# Altium footprint library FPGAENTRY.PcbLib: 36 footprints (part 2 of 3)
Each footprint in its own frame and in the unit in brackets; x right, y up, seen from the top. Pads: shape width x height; smd on the part's side, far side on the other; paste and mask are expansions set on the pad; w line width, h text height; cw(c..) or ccw(c..) is an arc to the next point about the centre after c.
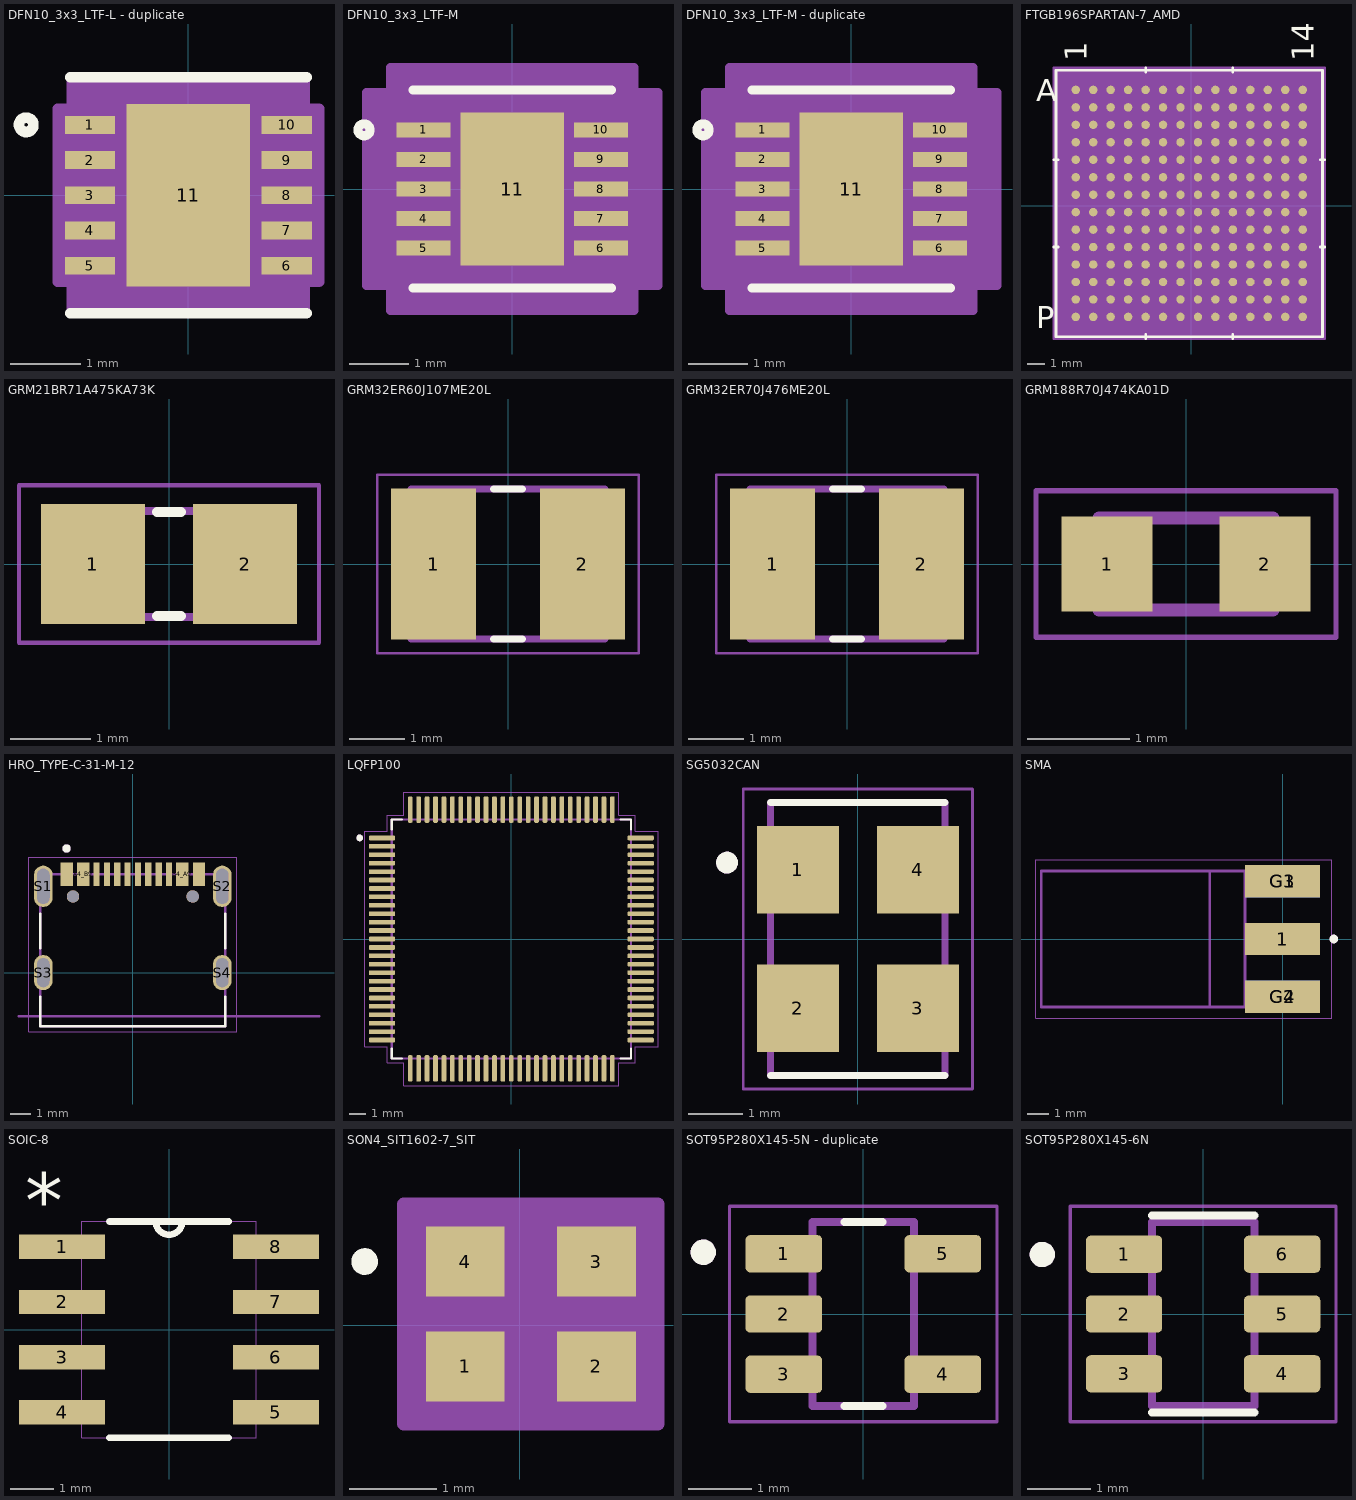
[diagram p1: the footprints below, top view; thin cyan lines are the x and y axes]

## DFN10_3x3_LTF-L - duplicate [mil]
pads (11):
  rect 28x10 smd paste+0 mask+0: 1(-55,39.37) 2(-55,19.68) 3(-55,0) 4(-55,-19.68) 5(-55,-39.37) 6(55,-39.37) 7(55,-19.68) 8(55,0) 9(55,19.68) 10(55,39.37)
  rect 69x102 smd paste+0 mask+0: 11(0,0)
Top Overlay:
  circle w6: c-90.69,39.37 r4
  lines w6: -66,-66 66,-66 ; -66,66 66,66
  text ".Designator" at -137.5,-25 h50
Top Paste:
  region: 30.56,47.06 -30.56,47.06 -30.56,3.94 30.56,3.94
  region: 30.56,-3.94 -30.56,-3.94 -30.56,-47.06 30.56,-47.06
Mechanical 13:
  circle w1: c-41,39.37 r3
  lines w1: -12,61 ccw(c0,61) 12,61 ; -61,-61 61,-61 61,61 -61,61 -61,-61
  text ".Designator" at -137.5,-25 h50
Mechanical 15:
  region: -65,-48.37 -73,-48.37 -73,48.37 -65,48.37 -65,65 65,65 65,48.37 73,48.37 73,-48.37 65,-48.37 65,-65 -65,-65
  lines w6: -73,-48.37 -73,48.37 -65,48.37 -65,65 65,65 65,48.37 73,48.37 73,-48.37 65,-48.37 65,-65 -65,-65 -65,-48.37 -73,-48.37
3D body "DFN10_3x3_LTF.step": height 31.1, standoff 0, extent -60.98,-60.98 60.98,60.98

## DFN10_3x3_LTF-M [mil]
pads (11):
  rect 36x10 smd paste+0 mask+0: 1(-59,39.37) 2(-59,19.68) 3(-59,0) 4(-59,-19.68) 5(-59,-39.37) 6(59,-39.37) 7(59,-19.68) 8(59,0) 9(59,19.68) 10(59,39.37)
  rect 69x102 smd paste+0 mask+0: 11(0,0)
Top Overlay:
  circle w6: c-98.69,39.37 r4
  lines w6: -66,-66 66,-66 ; -66,66 66,66
  text ".Designator" at -137.5,-25 h50
Top Paste:
  region: 30.56,-3.94 -30.56,-3.94 -30.56,-47.06 30.56,-47.06
  region: 30.56,47.06 -30.56,47.06 -30.56,3.94 30.56,3.94
Mechanical 13:
  circle w1: c-41,39.37 r3
  lines w1: -12,61 ccw(c0,61) 12,61 ; -61,-61 -61,61 61,61 61,-61 -61,-61
  text ".Designator" at -137.5,-25 h50
Mechanical 15:
  region: -81,-64.37 -97,-64.37 -97,64.37 -81,64.37 -81,81 81,81 81,64.37 97,64.37 97,-64.37 81,-64.37 81,-81 -81,-81
  lines w6: -97,-64.37 -81,-64.37 -81,-81 81,-81 81,-64.37 97,-64.37 97,64.37 81,64.37 81,81 -81,81 -81,64.37 -97,64.37 -97,-64.37
3D body "DFN10_3x3_LTF.step": height 31.1, standoff 0, extent -60.98,-60.98 60.98,60.98

## DFN10_3x3_LTF-M - duplicate [mil]
pads (11):
  rect 36x10 smd paste+0 mask+0: 1(-59,39.37) 2(-59,19.68) 3(-59,0) 4(-59,-19.68) 5(-59,-39.37) 6(59,-39.37) 7(59,-19.68) 8(59,0) 9(59,19.68) 10(59,39.37)
  rect 69x102 smd paste+0 mask+0: 11(0,0)
Top Overlay:
  circle w6: c-98.69,39.37 r4
  lines w6: -66,-66 66,-66 ; -66,66 66,66
  text ".Designator" at -137.5,-25 h50
Top Paste:
  region: 30.56,-3.94 -30.56,-3.94 -30.56,-47.06 30.56,-47.06
  region: 30.56,47.06 -30.56,47.06 -30.56,3.94 30.56,3.94
Mechanical 13:
  circle w1: c-41,39.37 r3
  lines w1: -12,61 ccw(c0,61) 12,61 ; -61,-61 -61,61 61,61 61,-61 -61,-61
  text ".Designator" at -137.5,-25 h50
Mechanical 15:
  region: -81,-64.37 -97,-64.37 -97,64.37 -81,64.37 -81,81 81,81 81,64.37 97,64.37 97,-64.37 81,-64.37 81,-81 -81,-81
  lines w6: -97,-64.37 -81,-64.37 -81,-81 81,-81 81,-64.37 97,-64.37 97,64.37 81,64.37 81,81 -81,81 -81,64.37 -97,64.37 -97,-64.37
3D body "DFN10_3x3_LTF.step": height 31.1, standoff 0, extent -60.98,-60.98 60.98,60.98

## FTGB196SPARTAN-7_AMD [mil]
pads (196):
  round 19 smd paste+0 mask+0: A1(-260.91,260.91) A2(-221.54,260.91) A3(-182.17,260.91) A4(-142.8,260.91) A5(-103.43,260.91) A6(-64.06,260.91) A7(-24.69,260.91) A8(14.69,260.91) A9(54.06,260.91) A10(93.43,260.91) A11(132.8,260.91) A12(172.17,260.91) A13(211.54,260.91) A14(250.91,260.91) B1(-260.91,221.54) B2(-221.54,221.54) B3(-182.17,221.54) B4(-142.8,221.54) B5(-103.43,221.54) B6(-64.06,221.54) B7(-24.69,221.54) B8(14.69,221.54) B9(54.06,221.54) B10(93.43,221.54) B11(132.8,221.54) B12(172.17,221.54) B13(211.54,221.54) B14(250.91,221.54) C1(-260.91,182.17) C2(-221.54,182.17) C3(-182.17,182.17) C4(-142.8,182.17) C5(-103.43,182.17) C6(-64.06,182.17) C7(-24.69,182.17) C8(14.69,182.17) C9(54.06,182.17) C10(93.43,182.17) C11(132.8,182.17) C12(172.17,182.17) C13(211.54,182.17) C14(250.91,182.17) D1(-260.91,142.8) D2(-221.54,142.8) D3(-182.17,142.8) D4(-142.8,142.8) D5(-103.43,142.8) D6(-64.06,142.8) D7(-24.69,142.8) D8(14.69,142.8) D9(54.06,142.8) D10(93.43,142.8) D11(132.8,142.8) D12(172.17,142.8) D13(211.54,142.8) D14(250.91,142.8) E1(-260.91,103.43) E2(-221.54,103.43) E3(-182.17,103.43) E4(-142.8,103.43) E5(-103.43,103.43) E6(-64.06,103.43) E7(-24.69,103.43) E8(14.69,103.43) E9(54.06,103.43) E10(93.43,103.43) E11(132.8,103.43) E12(172.17,103.43) E13(211.54,103.43) E14(250.91,103.43) F1(-260.91,64.06) F2(-221.54,64.06) F3(-182.17,64.06) F4(-142.8,64.06) F5(-103.43,64.06) F6(-64.06,64.06) F7(-24.69,64.06) F8(14.69,64.06) F9(54.06,64.06) F10(93.43,64.06) F11(132.8,64.06) F12(172.17,64.06) F13(211.54,64.06) F14(250.91,64.06) G1(-260.91,24.69) G2(-221.54,24.69) G3(-182.17,24.69) G4(-142.8,24.69) G5(-103.43,24.69) G6(-64.06,24.69) G7(-24.69,24.69) G8(14.69,24.69) G9(54.06,24.69) G10(93.43,24.69) G11(132.8,24.69) G12(172.17,24.69) G13(211.54,24.69) G14(250.91,24.69) H1(-260.91,-14.69) H2(-221.54,-14.69) H3(-182.17,-14.69) H4(-142.8,-14.69) H5(-103.43,-14.69) H6(-64.06,-14.69) H7(-24.69,-14.69) H8(14.69,-14.69) H9(54.06,-14.69) H10(93.43,-14.69) H11(132.8,-14.69) H12(172.17,-14.69) H13(211.54,-14.69) H14(250.91,-14.69) J1(-260.91,-54.06) J2(-221.54,-54.06) J3(-182.17,-54.06) J4(-142.8,-54.06) J5(-103.43,-54.06) J6(-64.06,-54.06) J7(-24.69,-54.06) J8(14.69,-54.06) J9(54.06,-54.06) J10(93.43,-54.06) J11(132.8,-54.06) J12(172.17,-54.06) J13(211.54,-54.06) J14(250.91,-54.06) K1(-260.91,-93.43) K2(-221.54,-93.43) K3(-182.17,-93.43) K4(-142.8,-93.43) K5(-103.43,-93.43) K6(-64.06,-93.43) K7(-24.69,-93.43) K8(14.69,-93.43) K9(54.06,-93.43) K10(93.43,-93.43) K11(132.8,-93.43) K12(172.17,-93.43) K13(211.54,-93.43) K14(250.91,-93.43) L1(-260.91,-132.8) L2(-221.54,-132.8) L3(-182.17,-132.8) L4(-142.8,-132.8) L5(-103.43,-132.8) L6(-64.06,-132.8) L7(-24.69,-132.8) L8(14.69,-132.8) L9(54.06,-132.8) L10(93.43,-132.8) L11(132.8,-132.8) L12(172.17,-132.8) L13(211.54,-132.8) L14(250.91,-132.8) M1(-260.91,-172.17) M2(-221.54,-172.17) M3(-182.17,-172.17) M4(-142.8,-172.17) M5(-103.43,-172.17) M6(-64.06,-172.17) M7(-24.69,-172.17) M8(14.69,-172.17) M9(54.06,-172.17) M10(93.43,-172.17) M11(132.8,-172.17) M12(172.17,-172.17) M13(211.54,-172.17) M14(250.91,-172.17) N1(-260.91,-211.54) N2(-221.54,-211.54) N3(-182.17,-211.54) N4(-142.8,-211.54) N5(-103.43,-211.54) N6(-64.06,-211.54) N7(-24.69,-211.54) N8(14.69,-211.54) N9(54.06,-211.54) N10(93.43,-211.54) N11(132.8,-211.54) N12(172.17,-211.54) N13(211.54,-211.54) N14(250.91,-211.54) P1(-260.91,-250.91) P2(-221.54,-250.91) P3(-182.17,-250.91) P4(-142.8,-250.91) P5(-103.43,-250.91) P6(-64.06,-250.91) P7(-24.69,-250.91) P8(14.69,-250.91) P9(54.06,-250.91) P10(93.43,-250.91) P11(132.8,-250.91) P12(172.17,-250.91) P13(211.54,-250.91) P14(250.91,-250.91)
Top Overlay:
  lines w6: -310.5,-93.43 -300.5,-93.43 ; -310.5,103.43 -300.5,103.43 ; -103.43,-300.5 -103.43,-290.5 ; -103.43,300.5 -103.43,310.5 ; 93.43,-300.5 93.43,-290.5 ; 93.43,300.5 93.43,310.5 ; 290.5,-93.43 300.5,-93.43 ; 290.5,103.43 300.5,103.43 ; -305.5,-295.5 -305.5,305.5 295.5,305.5 295.5,-295.5 -305.5,-295.5
  text ".Designator" at -142.5,-20 h50
  text "14" at 275.91,325.5 h50
  text "1" at -235.91,325.5 h50
  text "P" at -350.5,-275.91 h50
  text "A" at -350.5,235.91 h50
Bottom Overlay:
  text "14" at 225.91,325.5 h50
  text "1" at -285.91,325.5 h50
  text "P" at -325.5,-275.91 h50
  text "A" at -325.5,235.91 h50
Mechanical 13:
  lines w1: -300.5,280.81 -280.81,300.5 ; -300.5,-290.5 -300.5,300.5 290.5,300.5 290.5,-290.5 -300.5,-290.5
  text "14" at 275.91,325.5 h50
  text "1" at -235.91,325.5 h50
  text "P" at -350.5,-275.91 h50
  text "A" at -350.5,235.91 h50
  text ".Designator" at -142.5,-20 h50
Mechanical 15:
  region: 300.5,-300.5 -310.5,-300.5 -310.5,310.5 300.5,310.5
  lines w6: -310.5,-300.5 300.5,-300.5 300.5,310.5 -310.5,310.5 -310.5,-300.5
3D body "FTGB196SPARTAN-7_AMD.step": height 61.1, standoff 0.01, extent -300.51,-290.51 290.51,300.51

## GRM21BR71A475KA73K [mm]
pads (2):
  rect 1.3x1.5 smd paste+0 mask+0.102: 1(-0.95,0) 2(0.95,0)
Top Overlay:
  lines w0.127: -0.15,-0.65 0.15,-0.65 ; -0.15,0.65 0.15,0.65
Mechanical 13:
  region: 1.106,-0.724 0.356,-0.724 0.356,0.726 1.106,0.726
  region: -0.342,-0.724 -1.092,-0.724 -1.092,0.726 -0.342,0.726
  lines w0.102: -0.381,0.66 0.381,0.66 ; -0.356,-0.66 0.381,-0.66
Mechanical 15:
  lines w0.051: -1.873,-0.983 -1.873,0.983 1.873,0.983 1.873,-0.983 -1.873,-0.983
3D body "G-21_MUR.step": height 1.45, standoff 0, extent -1.003,-0.622 1.003,0.622

## GRM32ER60J107ME20L [mm]
pads (2):
  rect 1.53x2.72 smd: 1(-1.341,0) 2(1.341,0)
Top Overlay:
  lines w0.127: -0.26,-1.35 0.26,-1.35 ; -0.26,1.35 0.26,1.35
Mechanical 13:
  lines w0.127: -1.75,-1.35 -1.75,1.35 1.75,1.35 1.75,-1.35 -1.75,-1.35
Mechanical 15:
  lines w0.05: -2.355,-1.608 -2.355,1.608 2.355,1.608 2.355,-1.608 -2.355,-1.608
3D body "step_temp.STEP": height 2.7, standoff 0, extent -1.6,-1.25 1.6,1.25

## GRM32ER70J476ME20L [mm]
pads (2):
  rect 1.53x2.72 smd: 1(-1.341,0) 2(1.341,0)
Top Overlay:
  lines w0.127: -0.26,-1.35 0.26,-1.35 ; -0.26,1.35 0.26,1.35
Mechanical 13:
  lines w0.127: -1.75,-1.35 -1.75,1.35 1.75,1.35 1.75,-1.35 -1.75,-1.35
Mechanical 15:
  lines w0.05: -2.355,-1.608 -2.355,1.608 2.355,1.608 2.355,-1.608 -2.355,-1.608
3D body "step_temp.STEP": height 2.7, standoff 0, extent -1.6,-1.25 1.6,1.25

## GRM188R70J474KA01D [mm]
pads (2):
  rect 0.89x0.93 smd: 1(-0.77,0) 2(0.77,0)
Mechanical 13:
  lines w0.127: -0.85,-0.45 -0.85,0.45 0.85,0.45 0.85,-0.45 -0.85,-0.45
Mechanical 15:
  lines w0.05: -1.465,-0.715 -1.465,0.715 1.465,0.715 1.465,-0.715 -1.465,-0.715
3D body "step_temp.STEP": height 0.9, standoff 0, extent -0.8,-0.4 0.8,0.4

## HRO_TYPE-C-31-M-12 [mm]
height 3.26
pads (18):
  rect 0.6x1.14 smd mask+0.05: A1_B12(-3.2,4.75) A4_B9(-2.4,4.75) B1_A12(3.2,4.75) B4_A9(2.4,4.75)
  rect 0.3x1.14 smd mask+0.05: A5(-1.25,4.75) A6(-0.25,4.75) A7(0.25,4.75) A8(1.25,4.75) B5(1.75,4.75) B6(0.75,4.75) B7(-0.75,4.75) B8(-1.75,4.75)
  oval 0.9x2 hole 0.6 slot 1.7 at 90 deg: S1(-4.325,4.17) S2(4.325,4.17)
  oval 0.9x1.7 hole 0.6 slot 1.4 at 90 deg: S3(-4.325,0) S4(4.325,0)
  round 0.6 hole 0.6 unplated: ""(-2.89,3.68) ""(2.89,3.68)
Top Overlay:
  circle w0.2: c-3.2,6 r0.1
  lines w0.127: -4.47,-1.17 -4.47,-2.6 4.47,-2.6 4.47,-1.17 ; -4.47,1.17 -4.47,2.85 ; 4.47,1.17 4.47,2.85
Mechanical 13:
  circle w0.2: c-3.2,6 r0.1
  lines w0.127: -5.5,-2.11 9,-2.11 ; -4.47,-2.6 4.47,-2.6 4.47,4.75 -4.47,4.75 -4.47,-2.6
  text "PCB EDGE" at 5.2,-1.9 h0.61
Mechanical 15:
  lines w0.05: -5.025,-2.85 -5.025,5.57 5.025,5.57 5.025,-2.85 -5.025,-2.85
3D body "step_temp.STEP": height 3.31, standoff -0.99, extent -4.47,-2.6 4.47,5.305

## LQFP100 [mm]
pads (100):
  rrect50% 1.56x0.28 smd: 1(-7.68,6) 2(-7.68,5.5) 3(-7.68,5) 4(-7.68,4.5) 5(-7.68,4) 6(-7.68,3.5) 7(-7.68,3) 8(-7.68,2.5) 9(-7.68,2) 10(-7.68,1.5) 11(-7.68,1) 12(-7.68,0.5) 13(-7.68,0) 14(-7.68,-0.5) 15(-7.68,-1) 16(-7.68,-1.5) 17(-7.68,-2) 18(-7.68,-2.5) 19(-7.68,-3) 20(-7.68,-3.5) 21(-7.68,-4) 22(-7.68,-4.5) 23(-7.68,-5) 24(-7.68,-5.5) 25(-7.68,-6) 51(7.68,-6) 52(7.68,-5.5) 53(7.68,-5) 54(7.68,-4.5) 55(7.68,-4) 56(7.68,-3.5) 57(7.68,-3) 58(7.68,-2.5) 59(7.68,-2) 60(7.68,-1.5) 61(7.68,-1) 62(7.68,-0.5) 63(7.68,0) 64(7.68,0.5) 65(7.68,1) 66(7.68,1.5) 67(7.68,2) 68(7.68,2.5) 69(7.68,3) 70(7.68,3.5) 71(7.68,4) 72(7.68,4.5) 73(7.68,5) 74(7.68,5.5) 75(7.68,6)
  rrect50% 0.28x1.56 smd: 26(-6,-7.68) 27(-5.5,-7.68) 28(-5,-7.68) 29(-4.5,-7.68) 30(-4,-7.68) 31(-3.5,-7.68) 32(-3,-7.68) 33(-2.5,-7.68) 34(-2,-7.68) 35(-1.5,-7.68) 36(-1,-7.68) 37(-0.5,-7.68) 38(0,-7.68) 39(0.5,-7.68) 40(1,-7.68) 41(1.5,-7.68) 42(2,-7.68) 43(2.5,-7.68) 44(3,-7.68) 45(3.5,-7.68) 46(4,-7.68) 47(4.5,-7.68) 48(5,-7.68) 49(5.5,-7.68) 50(6,-7.68) 76(6,7.68) 77(5.5,7.68) 78(5,7.68) 79(4.5,7.68) 80(4,7.68) 81(3.5,7.68) 82(3,7.68) 83(2.5,7.68) 84(2,7.68) 85(1.5,7.68) 86(1,7.68) 87(0.5,7.68) 88(0,7.68) 89(-0.5,7.68) 90(-1,7.68) 91(-1.5,7.68) 92(-2,7.68) 93(-2.5,7.68) 94(-3,7.68) 95(-3.5,7.68) 96(-4,7.68) 97(-4.5,7.68) 98(-5,7.68) 99(-5.5,7.68) 100(-6,7.68)
Top Overlay:
  circle w0.2: c-9,6 r0.1
  lines w0.127: -7.1,-6.5 -7.1,-7.1 -6.5,-7.1 ; -7.1,6.5 -7.1,7.1 -6.5,7.1 ; 6.5,-7.1 7.1,-7.1 7.1,-6.5 ; 6.5,7.1 7.1,7.1 7.1,6.5
Mechanical 13:
  circle w0.2: c-9,6 r0.1
  lines w0.127: -7.1,-7.1 -7.1,7.1 7.1,7.1 7.1,-7.1 -7.1,-7.1
Mechanical 15:
  lines w0.05: -8.71,-6.39 -8.71,6.39 -7.35,6.39 -7.35,7.35 -6.39,7.35 -6.39,8.71 6.39,8.71 6.39,7.35 7.35,7.35 7.35,6.39 8.71,6.39 8.71,-6.39 7.35,-6.39 7.35,-7.35 6.39,-7.35 6.39,-8.71 -6.39,-8.71 -6.39,-7.35 -7.35,-7.35 -7.35,-6.39 -8.71,-6.39
3D body "step_temp.STEP": height 1.6, standoff 0, extent -8,-8 8,8

## SG5032CAN [mm]
pads (4):
  rect 1.5x1.6 smd: 1(-1.1,1.27) 2(-1.1,-1.27) 3(1.1,-1.27) 4(1.1,1.27)
Top Overlay:
  circle w0.2: c-2.4,1.4 r0.1
  lines w0.127: -1.6,-2.5 1.6,-2.5 ; -1.6,2.5 1.6,2.5
Mechanical 13:
  circle w0.2: c-2.4,1.4 r0.1
  lines w0.127: -1.6,-2.5 1.6,-2.5 1.6,2.5 -1.6,2.5 -1.6,-2.5
Mechanical 15:
  lines w0.05: -2.1,-2.75 2.1,-2.75 2.1,2.75 -2.1,2.75 -2.1,-2.75

## SMA [mm]
pads (5):
  rect 3.5x1.5 smd: 1(0,0) G1(0,2.7) G2(0,-2.7)
  rect 3.5x1.5 smd far side: G3(0,2.7) G4(0,-2.7)
Top Overlay:
  circle w0.2: c2.4,0 r0.1
Mechanical 13:
  circle w0.2: c2.4,0 r0.1
  lines w0.127: -3.4,-3.175 -11.27,-3.175 -11.27,3.175 -3.4,3.175 ; -3.4,-3.175 -3.4,3.175 ; -3.4,-3.175 -1.75,-3.175 -1.75,3.175 -3.4,3.175
Mechanical 14:
  lines w0.127: -3.4,-3.175 -11.27,-3.175 -11.27,3.175 -3.4,3.175 ; -3.4,-3.175 -1.75,-3.175 -1.75,3.175 -3.4,3.175 ; -3.4,-3.175 -3.4,3.175
Mechanical 15:
  lines w0.05: -11.52,-3.7 -11.52,3.7 2.31,3.7 2.31,-3.7 -11.52,-3.7
Mechanical 16:
  lines w0.05: -11.52,-3.7 -11.52,3.7 2.31,3.7 2.31,-3.7 -11.52,-3.7
3D body "step_temp.STEP": height 3.55, standoff -2.8, extent -11.27,-3.175 2.06,3.175

## SOIC-8 [mil]
pads (8):
  rect 78x22 smd: 1(-97,75) 2(-97,25) 3(-97,-25) 4(-97,-75) 5(97,-75) 6(97,-25) 7(97,25) 8(97,75)
Top Overlay:
  lines w6: -54,-98 54,-98 ; -54,98 -12,98 ; 54,98 12,98 ; -12,98 ccw(c0,98) 12,98 ; -12,98 12,98
  text "*" at -130.21,92.15 h50.08
Mechanical 13:
  lines w0: -12,98 ccw(c0,98) 12,98 ; -12,98 12,98 ; -12,98 -79,98 -79,-98 79,-98 79,98 12,98 ; -122,-85 -122,-65 -79,-65 -79,-85 -122,-85 ; -122,-35 -122,-15 -79,-15 -79,-35 -122,-35 ; -122,15 -122,35 -79,35 -79,15 -122,15 ; -122,65 -122,85 -79,85 -79,65 -122,65 ; 79,-85 79,-65 122,-65 122,-85 79,-85 ; 79,-35 79,-15 122,-15 122,-35 79,-35 ; 79,15 79,35 122,35 122,15 79,15 ; 79,65 79,85 122,85 122,65 79,65
  text "*" at -130.17,92.12 h50.06
3D body "step_temp.STEP": height 68.9, standoff 0, extent -118.11,-96.46 118.11,96.46

## SON4_SIT1602-7_SIT [mm]
pads (4):
  rect 0.9x0.8 smd paste-0.4 mask+0: 1(-0.623,-0.473) 2(0.877,-0.473) 3(0.877,0.727) 4(-0.623,0.727)
Top Overlay:
  circle w0.152: c-1.775,0.727 r0.076
  text ".Designator" at -3.365,-0.508 h1.27
Mechanical 13:
  circle w0.025: c-0.173,0.727 r0.076
  lines w0.025: -0.178,0.927 ccw(c0.127,0.927) 0.432,0.927 ; -0.873,-0.673 -0.873,0.927 1.127,0.927 1.127,-0.673 -0.873,-0.673
  text ".Designator" at -3.365,-0.508 h1.27
Mechanical 15:
  region: -1.127,-1.127 -1.327,-1.127 -1.327,1.381 -1.127,1.381 1.381,1.381 1.581,1.381 1.581,-1.127 1.381,-1.127
  lines w0.152: -1.327,-1.127 -1.127,-1.127 1.381,-1.127 1.581,-1.127 1.581,1.381 1.381,1.381 -1.127,1.381 -1.327,1.381 -1.327,-1.127
3D body "SON4_SIT1602-7_SIT.step": height 0.8, standoff 0, extent -0.873,-0.673 1.127,0.927

## SOT95P280X145-5N - duplicate [mm]
pads (5):
  rrect25% 1.21x0.59 smd: 1(-1.255,0.95) 2(-1.255,0) 3(-1.255,-0.95) 4(1.255,-0.95) 5(1.255,0.95)
Top Overlay:
  circle w0.2: c-2.525,0.975 r0.1
  lines w0.127: -0.3,-1.45 0.3,-1.45 ; -0.3,1.45 0.3,1.45
Mechanical 13:
  circle w0.2: c-2.525,0.975 r0.1
  lines w0.127: -0.8,-1.45 0.8,-1.45 0.8,1.45 -0.8,1.45 -0.8,-1.45
Mechanical 15:
  lines w0.05: -2.11,-1.7 -2.11,1.7 2.11,1.7 2.11,-1.7 -2.11,-1.7
3D body "step_temp.STEP": height 1.45, standoff 0, extent -1.4,-1.45 1.4,1.45

## SOT95P280X145-6N [mm]
pads (6):
  rrect25% 1.21x0.59 smd: 1(-1.255,0.95) 2(-1.255,0) 3(-1.255,-0.95) 4(1.255,-0.95) 5(1.255,0) 6(1.255,0.95)
Top Overlay:
  circle w0.2: c-2.555,0.945 r0.1
  lines w0.127: -0.813,-1.565 0.813,-1.565 ; -0.813,1.565 0.813,1.565
Mechanical 13:
  circle w0.2: c-2.555,0.945 r0.1
  lines w0.127: -0.813,-1.462 -0.813,1.462 0.813,1.462 0.813,-1.462 -0.813,-1.462
Mechanical 15:
  lines w0.05: -2.11,-1.713 2.11,-1.713 2.11,1.713 -2.11,1.713 -2.11,-1.713
3D body "step_temp.STEP": height 0.4, standoff -1.05, extent -1.4,-1.462 1.4,1.462